# Altium schematic symbol library TEL0124.SchLib: 1 symbol
Pins are listed as number, name and electrical type; pins without a type are passive.

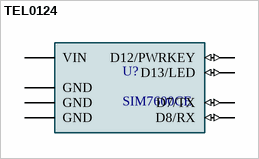
[diagram p0: symbol TEL0124]

## TEL0124
designator U?, comment SIM7600CE
SIM7600CE-T 4G; MF: Arduino; MP: ABX00087; SnapEDA_Link: https://www.snapeda.com/parts/ABX00087/Arduino/view-part/?ref=snap; Package: None; Value: *; Check_prices: https://www.snapeda.com/parts/ABX00087/Arduino/view-part/?ref=eda
footprint TEL0124
pins: JA6 GND, JA7 GND, JA8 VIN (power), JD8 D7/TX (io), JD9 D8/RX (io), JD13 D12/PWRKEY (io), JD14 D13/LED (io), JD15 GND